# Altium footprint library PCB_IntegratedCircuit.PcbLib: 62 footprints (part 1 of 4)
Each footprint in its own frame and in the unit in brackets; x right, y up, seen from the top. Pads: shape width x height; smd on the part's side, far side on the other; paste and mask are expansions set on the pad; w line width, h text height; cw(c..) or ccw(c..) is an arc to the next point about the centre after c.
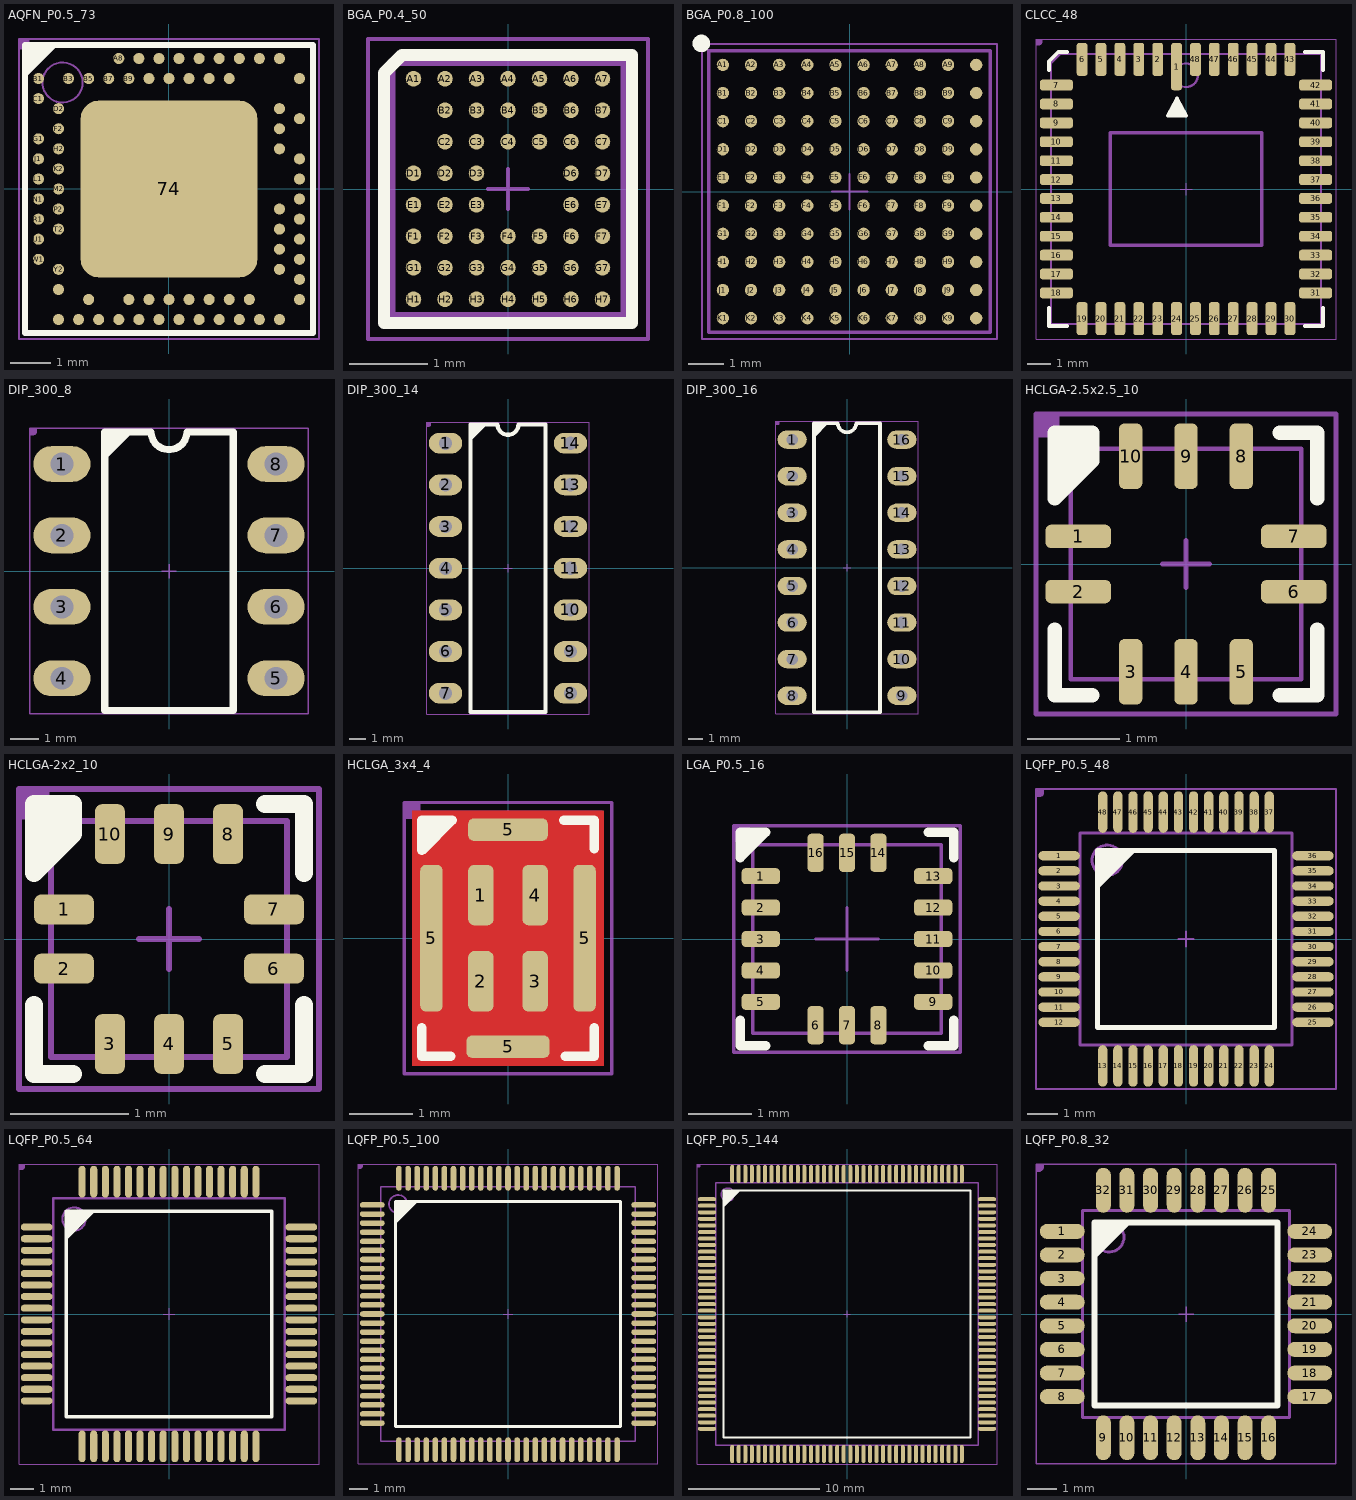
[diagram p0: the footprints below, top view; thin cyan lines are the x and y axes]

## AQFN_P0.5_73 [mm]
height 0.85
pads (74):
  rrect20% 4.4x4.4 smd mask+0.05: 74(0,0)
  round 0.275 smd paste+0.012 mask+0.05: A8(-1.25,3.25) A10(-0.75,3.25) A12(-0.25,3.25) A14(0.25,3.25) A16(0.75,3.25) A18(1.25,3.25) A20(1.75,3.25) A22(2.25,3.25) A23(2.75,3.25) AA24(3.25,-2.25) AB2(-2.75,-2.5) AC5(-2,-2.75) AC9(-1,-2.75) AC11(-0.5,-2.75) AC13(0,-2.75) AC15(0.5,-2.75) AC17(1,-2.75) AC19(1.5,-2.75) AC21(2,-2.75) AC24(3.25,-2.75) AD2(-2.75,-3.25) AD4(-2.25,-3.25) AD6(-1.75,-3.25) AD8(-1.25,-3.25) AD10(-0.75,-3.25) AD12(-0.25,-3.25) AD14(0.25,-3.25) AD16(0.75,-3.25) AD18(1.25,-3.25) AD20(1.75,-3.25) AD22(2.25,-3.25) AD23(2.75,-3.25) B1(-3.25,2.75) B3(-2.5,2.75) B5(-2,2.75) B7(-1.5,2.75) B9(-1,2.75) B11(-0.5,2.75) B13(0,2.75) B15(0.5,2.75) B17(1,2.75) B19(1.5,2.75) B24(3.25,2.75) C1(-3.25,2.25) D2(-2.75,2) D23(2.75,2) E24(3.25,1.75) F2(-2.75,1.5) F23(2.75,1.5) G1(-3.25,1.25) H2(-2.75,1) H23(2.75,1) J1(-3.25,0.75) J24(3.25,0.75) K2(-2.75,0.5) L1(-3.25,0.25) L24(3.25,0.25) M2(-2.75,0) N1(-3.25,-0.25) N24(3.25,-0.25) P2(-2.75,-0.5) P23(2.75,-0.5) R1(-3.25,-0.75) R24(3.25,-0.75) T2(-2.75,-1) T23(2.75,-1) U1(-3.25,-1.25) U24(3.25,-1.25) V23(2.75,-1.5) W1(-3.25,-1.75) W24(3.25,-1.75) Y2(-2.75,-2) Y23(2.75,-2)
Top Overlay:
  region: -2.769,3.581 -3.581,2.769 -3.581,3.581
  lines w0.152: -3.581,-3.581 -3.581,3.581 3.581,3.581 3.581,-3.581 -3.581,-3.581
Mechanical 13:
  circle w0.051: c-2.65,2.65 r0.5
  lines w0.051: -0.5,0 0.5,0 ; 0,-0.5 0,0.5 ; -3.531,-3.531 -3.531,3.531 3.531,3.531 3.531,-3.531 -3.531,-3.531
T-Component:
  region: -3.734,3.734 -3.48,3.734 -3.48,3.607 -3.48,3.582 -3.499,3.535 -3.535,3.499 -3.582,3.48 -3.607,3.48 -3.734,3.48
  lines w0.051: -3.734,-3.734 3.734,-3.734 3.734,3.734 -3.734,3.734 -3.734,-3.734
  text ".Designator" at -1.041,-0.635 h2.54
3D body "LGA88C25P25X25_700X700X85.step": height 0.85, standoff 0, extent -3.55,-3.55 3.55,3.55

## BGA_P0.4_50 [mm]
height 0.4
pads (50):
  round 0.198 smd: A1(-1.2,1.4) A2(-0.8,1.4) A3(-0.4,1.4) A4(0,1.4) A5(0.4,1.4) A6(0.8,1.4) A7(1.2,1.4) B2(-0.8,1) B3(-0.4,1) B4(0,1) B5(0.4,1) B6(0.8,1) B7(1.2,1) C2(-0.8,0.6) C3(-0.4,0.6) C4(0,0.6) C5(0.4,0.6) C6(0.8,0.6) C7(1.2,0.6) D1(-1.2,0.2) D2(-0.8,0.2) D3(-0.4,0.2) D6(0.8,0.2) D7(1.2,0.2) E1(-1.2,-0.2) E2(-0.8,-0.2) E3(-0.4,-0.2) E6(0.8,-0.2) E7(1.2,-0.2) F1(-1.2,-0.6) F2(-0.8,-0.6) F3(-0.4,-0.6) F4(0,-0.6) F5(0.4,-0.6) F6(0.8,-0.6) F7(1.2,-0.6) G1(-1.2,-1) G2(-0.8,-1) G3(-0.4,-1) G4(0,-1) G5(0.4,-1) G6(0.8,-1) G7(1.2,-1) H1(-1.2,-1.4) H2(-0.8,-1.4) H3(-0.4,-1.4) H4(0,-1.4) H5(0.4,-1.4) H6(0.8,-1.4) H7(1.2,-1.4)
Top Overlay:
  lines w0.152: -1.575,-1.702 -1.575,1.473 -1.346,1.702 1.575,1.702 1.575,-1.702 -1.575,-1.702
Mechanical 13:
  lines w0.051: -0.254,0 0.254,0 ; 0,-0.254 0,0.254
  lines w0.1: -1.48,-1.615 -1.48,1.615 1.48,1.615 1.48,-1.615 -1.48,-1.615
T-Component:
  lines w0.051: -1.778,-1.905 -1.778,1.905 1.778,1.905 1.778,-1.905 -1.778,-1.905
3D body "BGA56C40P7X8_296X323X40.step": height 0.4, standoff 0, extent -1.48,-1.615 1.48,1.615

## BGA_P0.8_100 [mm]
height 1.1
pads (100):
  round 0.35 smd: A1(-3.6,3.6) A2(-2.8,3.6) A3(-2,3.6) A4(-1.2,3.6) A5(-0.4,3.6) A6(0.4,3.6) A7(1.2,3.6) A8(2,3.6) A9(2.8,3.6) A10(3.6,3.6) B1(-3.6,2.8) B2(-2.8,2.8) B3(-2,2.8) B4(-1.2,2.8) B5(-0.4,2.8) B6(0.4,2.8) B7(1.2,2.8) B8(2,2.8) B9(2.8,2.8) B10(3.6,2.8) C1(-3.6,2) C2(-2.8,2) C3(-2,2) C4(-1.2,2) C5(-0.4,2) C6(0.4,2) C7(1.2,2) C8(2,2) C9(2.8,2) C10(3.6,2) D1(-3.6,1.2) D2(-2.8,1.2) D3(-2,1.2) D4(-1.2,1.2) D5(-0.4,1.2) D6(0.4,1.2) D7(1.2,1.2) D8(2,1.2) D9(2.8,1.2) D10(3.6,1.2) E1(-3.6,0.4) E2(-2.8,0.4) E3(-2,0.4) E4(-1.2,0.4) E5(-0.4,0.4) E6(0.4,0.4) E7(1.2,0.4) E8(2,0.4) E9(2.8,0.4) E10(3.6,0.4) F1(-3.6,-0.4) F2(-2.8,-0.4) F3(-2,-0.4) F4(-1.2,-0.4) F5(-0.4,-0.4) F6(0.4,-0.4) F7(1.2,-0.4) F8(2,-0.4) F9(2.8,-0.4) F10(3.6,-0.4) G1(-3.6,-1.2) G2(-2.8,-1.2) G3(-2,-1.2) G4(-1.2,-1.2) G5(-0.4,-1.2) G6(0.4,-1.2) G7(1.2,-1.2) G8(2,-1.2) G9(2.8,-1.2) G10(3.6,-1.2) H1(-3.6,-2) H2(-2.8,-2) H3(-2,-2) H4(-1.2,-2) H5(-0.4,-2) H6(0.4,-2) H7(1.2,-2) H8(2,-2) H9(2.8,-2) H10(3.6,-2) J1(-3.6,-2.8) J2(-2.8,-2.8) J3(-2,-2.8) J4(-1.2,-2.8) J5(-0.4,-2.8) J6(0.4,-2.8) J7(1.2,-2.8) J8(2,-2.8) J9(2.8,-2.8) J10(3.6,-2.8) K1(-3.6,-3.6) K2(-2.8,-3.6) K3(-2,-3.6) K4(-1.2,-3.6) K5(-0.4,-3.6) K6(0.4,-3.6) K7(1.2,-3.6) K8(2,-3.6) K9(2.8,-3.6) K10(3.6,-3.6)
Top Overlay:
  circle w0.25: c-4.21,4.21 r0.125
Mechanical 13:
  lines w0.1: -4,-4 -4,4 4,4 4,-4 -4,-4
T-Component:
  lines w0.051: -0.508,0 0.508,0 ; 0,-0.508 0,0.508 ; -4.191,-4.191 -4.191,4.191 4.191,4.191 4.191,-4.191 -4.191,-4.191
3D body "BGA100C80P10X10_800X800X110.step": height 1.1, standoff 0, extent -4,-4 4,4

## CLCC_48 [mil]
height 90.55
pads (48):
  rrect50% 18x79 smd: 1(-15.75,204)
  rrect50% 18x55 smd: 2(-47.24,216) 3(-78.74,216) 4(-110.24,216) 5(-141.73,216) 6(-173.23,216) 19(-173.23,-216) 20(-141.73,-216) 21(-110.24,-216) 22(-78.74,-216) 23(-47.24,-216) 24(-15.75,-216) 25(15.75,-216) 26(47.24,-216) 27(78.74,-216) 28(110.24,-216) 29(141.73,-216) 30(173.23,-216) 43(173.23,216) 44(141.73,216) 45(110.24,216) 46(78.74,216) 47(47.24,216) 48(15.75,216)
  rrect50% 55x18 smd: 7(-216,173.23) 8(-216,141.73) 9(-216,110.24) 10(-216,78.74) 11(-216,47.24) 12(-216,15.75) 13(-216,-15.75) 14(-216,-47.24) 15(-216,-78.74) 16(-216,-110.24) 17(-216,-141.73) 18(-216,-173.23) 31(216,-173.23) 32(216,-141.73) 33(216,-110.24) 34(216,-78.74) 35(216,-47.24) 36(216,-15.75) 37(216,15.75) 38(216,47.24) 39(216,78.74) 40(216,110.24) 41(216,141.73) 42(216,173.23)
Top Overlay:
  region: -15,151 -30.26,122 0.26,122
  lines w6: -228.35,-197.83 -228.35,-228.35 -197.83,-228.35 ; -228.35,197.83 -228.35,213.09 -213.09,228.35 -197.83,228.35 ; 197.83,-228.35 228.35,-228.35 228.35,-197.83 ; 197.83,228.35 228.35,228.35 228.35,197.83 ; -30.26,122 0.26,122 -15,151 -30.26,122
Mechanical 13:
  circle w3.94: c0,189.57 r19.68
  lines w2: -10,0 10,0 ; 0,-10 0,10
  lines w3.94: -225,-225 -225,209.74 -209.74,225 225,225 225,-225 -225,-225
  lines w6: -126,-94 -126,94 126,94 126,-94 -126,-94
T-Component:
  region: -250,250 -240,250 -240,245 -240,244.01 -240.76,242.17 -242.17,240.76 -244.01,240 -245,240 -250,240
  lines w2: -250,-250 250,-250 250,250 -250,250 -250,-250
  text ".Designator" at -41,-25 h100
3D body "User Library-CLCC48.STEP": height 79.69, standoff 0, extent -250,-250 250,250

## DIP_300_8 [mil]
pads (8):
  oval 80x50 hole 32: 1(-150,150) 2(-150,50) 3(-150,-50) 4(-150,-150) 5(150,-150) 6(150,-50) 7(150,50) 8(150,150)
Top Overlay:
  region: -90,194.69 -50.63,194.69 -90,155.31
  lines w10: -90,-195 -90,195 -25,195 ccw(c0,195) 25,195 90,195 90,-195 -90,-195
Mechanical 13:
  lines w2: -10,0 10,0 ; 0,-10 0,10
T-Component:
  region: -195,200 -185,200 -185,195 -185,194.01 -185.76,192.17 -187.17,190.76 -189.01,190 -190,190 -195,190
  lines w2: -195,-200 -195,200 195,200 195,-200 -195,-200
  text ".Designator" at -41,-25 h100
3D body "User Library-DIP8test.STEP": height 179.92, standoff -150, extent -153.94,-195.07 153.94,195.08

## DIP_300_14 [mil]
pads (14):
  oval 80x50 hole 32: 1(-150,300) 2(-150,200) 3(-150,100) 4(-150,0) 5(-150,-100) 6(-150,-200) 7(-150,-300) 8(150,-300) 9(150,-200) 10(150,-100) 11(150,0) 12(150,100) 13(150,200) 14(150,300)
Top Overlay:
  region: -90,344.69 -50.63,344.69 -90,305.31
  lines w10: -90,-345 -90,345 -25,345 ccw(c0,345) 25,345 90,345 90,-345 -90,-345
Mechanical 13:
  lines w2: -10,0 10,0 ; 0,-10 0,10
T-Component:
  region: -195,350 -185,350 -185,345 -185,344.01 -185.76,342.17 -187.17,340.76 -189.01,340 -190,340 -195,340
  lines w2: -195,-350 -195,350 195,350 195,-350 -195,-350
  text ".Designator" at -41,-25 h100
3D body "SW3dPS-DIP14-300.STEP": height 200, standoff -98.03, extent -154.92,-383.86 154.93,383.86

## DIP_300_16 [mil]
pads (16):
  oval 80x50 hole 32: 1(-150,350) 2(-150,250) 3(-150,150) 4(-150,50) 5(-150,-50) 6(-150,-150) 7(-150,-250) 8(-150,-350) 9(150,-350) 10(150,-250) 11(150,-150) 12(150,-50) 13(150,50) 14(150,150) 15(150,250) 16(150,350)
Top Overlay:
  region: -90,394.69 -50.63,394.69 -90,355.31
  lines w10: -90,-395 -90,395 -25,395 ccw(c0,395) 25,395 90,395 90,-395 -90,-395
Mechanical 13:
  lines w2: -10,0 10,0 ; 0,-10 0,10
T-Component:
  region: -195,400 -185,400 -185,395 -185,394.01 -185.76,392.17 -187.17,390.76 -189.01,390 -190,390 -195,390
  lines w2: -195,-400 195,-400 195,400 -195,400 -195,-400
  text ".Designator" at -41,-25 h100
3D body "User Library-DIP16-22mm.STEP": height 202.76, standoff -98.03, extent -155,-433.07 154.84,433.07

## HCLGA-2.5x2.5_10 [mil]
height 31.5
pads (10):
  rrect50% 28x10 smd: 1(-46,11.81) 2(-46,-11.81) 6(46,-11.81) 7(46,11.81)
  rrect50% 10x28 smd: 3(-23.62,-46) 4(0,-46) 5(23.62,-46) 8(23.62,46) 9(0,46) 10(-23.62,46)
Top Overlay:
  region: -40,44 -40,56 -56,56 -56,28
  lines w6: -56,-28 -56,-56 -40,-56 ; 40,-56 56,-56 56,-28 ; 40,56 56,56 56,28 ; -56,28 -56,56 -40,56 -40,44 -56,28
Top Solder:
  region: -32,-11.81 -32,11.81 -60,11.81 -60,-11.81
  region: 60,-11.81 60,11.81 32,11.81 32,-11.81
  region: 23.62,-32 -23.62,-32 -23.62,-60 23.62,-60
  rectangle: -23.62,32 23.62,60
Mechanical 13:
  lines w2: -10,0 10,0 ; 0,-10 0,10 ; -49.21,-49.21 49.22,-49.21 49.22,49.22 -49.21,49.22 -49.21,-49.21
T-Component:
  region: -64,64 -54,64 -54,59 -54,58.01 -54.76,56.17 -56.17,54.76 -58.01,54 -59,54 -64,54
  lines w2: -64,-64 64,-64 64,64 -64,64 -64,-64
  text ".Designator" at -41,-25 h100
3D body "PQFN60P250X250X80-10N.step": height 31.5, standoff -0.04, extent -49.21,-49.21 49.22,49.22

## HCLGA-2x2_10 [mil]
height 31.5
pads (10):
  rrect50% 20x10 smd: 1(-35,9.84) 2(-35,-9.84) 6(35,-9.84) 7(35,9.84)
  rrect50% 10x20 smd: 3(-19.68,-35) 4(0,-35) 5(19.68,-35) 8(19.68,35) 9(0,35) 10(-19.68,35)
Top Overlay:
  region: -32,45 -45,45 -45,22 -32,35
  lines w6: -45,-22 -45,-45 -32,-45 ; 32,-45 45,-45 45,-22 ; 32,45 45,45 45,22 ; -45,22 -32,35 -32,45 -45,45 -45,22
Top Solder:
  rectangle: -19.68,-45 19.68,-25
  region: 19.68,45 -19.68,45 -19.68,25 19.68,25
  region: 45,-9.84 45,9.84 25,9.84 25,-9.84
  region: -25,-9.84 -25,9.84 -45,9.84 -45,-9.84
Mechanical 13:
  lines w2: -10,0 10,0 ; 0,-10 0,10 ; -39.37,-39.37 39.37,-39.37 39.37,39.37 -39.37,39.37 -39.37,-39.37
T-Component:
  region: -50,50 -40,50 -40,45 -40,44.01 -40.76,42.17 -42.17,40.76 -44.01,40 -45,40 -50,40
  lines w2: -50,-50 50,-50 50,50 -50,50 -50,-50
  text ".Designator" at -41,-25 h100
3D body "PQFN50P200X200X80-10N.step": height 31.5, standoff -0.04, extent -39.37,-39.37 39.37,39.37

## HCLGA_3x4_4 [mil]
pads (8):
  rrect50% 16x38 smd: 1(-17,27) 2(-17,-27) 3(17,-27) 4(17,27)
  rrect50% 14x92 smd: 5(-48,0) 5(48,0)
  rrect50% 52x14 smd: 5(0,-68)
  rrect50% 50x14 smd: 5(0,68)
Top Layer:
  pour cut-out: -60,80 60,80 60,-80 -60,-80
Top Overlay:
  region: -54,74 -35,74 -54,55
  lines w6: -54,-56 -54,-74 -36,-74 ; 35,74 54,74 54,56 ; 36,-74 54,-74 54,-56 ; -54,55 -35,74 -54,74 -54,55
Mechanical 13:
  lines w2: -10,0 10,0 ; 0,-10 0,10 ; -59,-79 -59,79 59,79 59,-79 -59,-79
T-Component:
  region: -65,85 -55,85 -55,80 -55,79.01 -55.76,77.17 -57.17,75.76 -59.01,75 -60,75 -65,75
  lines w2: -65,-85 65,-85 65,85 -65,85 -65,-85
  text ".Designator" at -41,-25 h100
3D body "User Library-DFN12(3x4).STEP": height 29.92, standoff 0, extent -59.08,-78.74 59.1,78.74

## LGA_P0.5_16 [mil]
height 29.53
pads (16):
  rrect50% 24x10 smd: 1(-54,39.37) 2(-54,19.68) 3(-54,0) 4(-54,-19.68) 5(-54,-39.37) 9(54,-39.37) 10(54,-19.68) 11(54,0) 12(54,19.68) 13(54,39.37)
  rrect50% 10x24 smd: 6(-19.68,-54) 7(0,-54) 8(19.68,-54) 14(19.68,54) 15(0,54) 16(-19.68,54)
Top Overlay:
  region: -67,67 -51,67 -67,51
  lines w6: -67,-51 -67,-67 -51,-67 ; 51,-67 67,-67 67,-51 ; 51,67 67,67 67,51 ; -67,51 -67,67 -51,67 -67,51
Top Solder:
  region: 20,-41 -20,-41 -20,-67 20,-67
  region: -41,-40 -41,40 -67,40 -67,-40
  region: 41,40 41,-40 67,-40 67,40
  rectangle: -20,41 20,67
Mechanical 13:
  lines w2: -19.68,0 19.68,0 ; 0,-19.68 0,19.68 ; -59.06,-59.06 59.06,-59.06 59.06,59.06 -59.06,59.06 -59.06,-59.06
T-Component:
  region: -71,71 -61,71 -61,66 -61,65.01 -61.76,63.17 -63.17,61.76 -65.01,61 -66,61 -71,61
  lines w2: -71,-71 71,-71 71,71 -71,71 -71,-71
  text ".Designator" at -41,-25 h100
3D body "PQFN50P300X300X75-16L.step": height 29.53, standoff 0, extent -59.06,-59.06 59.06,59.06

## LQFP_P0.5_48 [mil]
height 62.99
pads (48):
  oval 54x12 smd: 1(-165,108.27) 2(-165,88.58) 3(-165,68.9) 4(-165,49.21) 5(-165,29.53) 6(-165,9.84) 7(-165,-9.84) 8(-165,-29.53) 9(-165,-49.21) 10(-165,-68.9) 11(-165,-88.58) 12(-165,-108.27) 25(165,-108.27) 26(165,-88.58) 27(165,-68.9) 28(165,-49.21) 29(165,-29.53) 30(165,-9.84) 31(165,9.84) 32(165,29.53) 33(165,49.21) 34(165,68.9) 35(165,88.58) 36(165,108.27)
  oval 12x54 smd: 13(-108.27,-165) 14(-88.58,-165) 15(-68.9,-165) 16(-49.21,-165) 17(-29.53,-165) 18(-9.84,-165) 19(9.84,-165) 20(29.53,-165) 21(49.21,-165) 22(68.9,-165) 23(88.58,-165) 24(108.27,-165) 37(108.27,165) 38(88.58,165) 39(68.9,165) 40(49.21,165) 41(29.53,165) 42(9.84,165) 43(-9.84,165) 44(-29.53,165) 45(-49.21,165) 46(-68.9,165) 47(-88.58,165) 48(-108.27,165)
Top Overlay:
  region: -115,115 -65,115 -115,65
  lines w6: -115,-115 115,-115 115,115 -115,115 -115,-115
Mechanical 13:
  circle w3.94: c-102.36,102.36 r19.68
  lines w2: -10,0 10,0 ; 0,-10 0,10
  lines w3.94: -137.8,-137.8 137.8,-137.8 137.8,137.8 -137.8,137.8 -137.8,-137.8
T-Component:
  region: -195,195 -185,195 -185,190 -185,189.01 -185.76,187.17 -187.17,185.76 -189.01,185 -190,185 -195,185
  lines w2: -195,-195 -195,195 195,195 195,-195 -195,-195
  text ".Designator" at -41,-25 h100
3D body "SW3dPS-Quad50M48.STEP": height 61.42, standoff 0, extent -177.16,-177.66 177.17,176.67

## LQFP_P0.5_64 [mil]
height 47.24
pads (64):
  oval 54x12 smd: 1(-225,147.64) 2(-225,127.95) 3(-225,108.27) 4(-225,88.58) 5(-225,68.9) 6(-225,49.21) 7(-225,29.53) 8(-225,9.84) 9(-225,-9.84) 10(-225,-29.53) 11(-225,-49.21) 12(-225,-68.9) 13(-225,-88.58) 14(-225,-108.27) 15(-225,-127.95) 16(-225,-147.64) 33(225,-147.64) 34(225,-127.95) 35(225,-108.27) 36(225,-88.58) 37(225,-68.9) 38(225,-49.21) 39(225,-29.53) 40(225,-9.84) 41(225,9.84) 42(225,29.53) 43(225,49.21) 44(225,68.9) 45(225,88.58) 46(225,108.27) 47(225,127.95) 48(225,147.64)
  oval 12x54 smd: 17(-147.64,-225) 18(-127.95,-225) 19(-108.27,-225) 20(-88.58,-225) 21(-68.9,-225) 22(-49.21,-225) 23(-29.53,-225) 24(-9.84,-225) 25(9.84,-225) 26(29.53,-225) 27(49.21,-225) 28(68.9,-225) 29(88.58,-225) 30(108.27,-225) 31(127.95,-225) 32(147.64,-225) 49(147.64,225) 50(127.95,225) 51(108.27,225) 52(88.58,225) 53(68.9,225) 54(49.21,225) 55(29.53,225) 56(9.84,225) 57(-9.84,225) 58(-29.53,225) 59(-49.21,225) 60(-68.9,225) 61(-88.58,225) 62(-108.27,225) 63(-127.95,225) 64(-147.64,225)
Top Overlay:
  region: -175,175 -125,175 -175,125
  lines w6: -175,-175 175,-175 175,175 -175,175 -175,-175
Mechanical 13:
  circle w3.94: c-161.42,161.42 r19.68
  lines w2: -10,0 10,0 ; 0,-10 0,10
  lines w3.94: -196.85,-196.85 -196.85,196.85 196.85,196.85 196.85,-196.85 -196.85,-196.85
T-Component:
  region: -255,255 -245,255 -245,250 -245,249.01 -245.76,247.17 -247.17,245.76 -249.01,245 -250,245 -255,245
  lines w2: -255,-255 -255,255 255,255 255,-255 -255,-255
  text ".Designator" at -41,-25 h100
3D body "User Library-lqpf64.STEP": height 59.06, standoff 0.79, extent -236.21,-236.22 236.23,236.22

## LQFP_P0.5_100 [mil]
height 62.99
pads (100):
  oval 54x12 smd: 1(-294,236.22) 2(-294,216.54) 3(-294,196.85) 4(-294,177.17) 5(-294,157.48) 6(-294,137.8) 7(-294,118.11) 8(-294,98.43) 9(-294,78.74) 10(-294,59.06) 11(-294,39.37) 12(-294,19.68) 13(-294,0) 14(-294,-19.69) 15(-294,-39.37) 16(-294,-59.06) 17(-294,-78.74) 18(-294,-98.43) 19(-294,-118.11) 20(-294,-137.8) 21(-294,-157.48) 22(-294,-177.17) 23(-294,-196.85) 24(-294,-216.54) 25(-294,-236.22) 51(294,-236.22) 52(294,-216.54) 53(294,-196.85) 54(294,-177.17) 55(294,-157.48) 56(294,-137.8) 57(294,-118.11) 58(294,-98.43) 59(294,-78.74) 60(294,-59.06) 61(294,-39.37) 62(294,-19.69) 63(294,0) 64(294,19.68) 65(294,39.37) 66(294,59.06) 67(294,78.74) 68(294,98.43) 69(294,118.11) 70(294,137.8) 71(294,157.48) 72(294,177.17) 73(294,196.85) 74(294,216.54) 75(294,236.22)
  oval 12x54 smd: 26(-236.22,-294) 27(-216.54,-294) 28(-196.85,-294) 29(-177.17,-294) 30(-157.48,-294) 31(-137.8,-294) 32(-118.11,-294) 33(-98.43,-294) 34(-78.74,-294) 35(-59.06,-294) 36(-39.37,-294) 37(-19.68,-294) 38(0,-294) 39(19.69,-294) 40(39.37,-294) 41(59.06,-294) 42(78.74,-294) 43(98.43,-294) 44(118.11,-294) 45(137.8,-294) 46(157.48,-294) 47(177.17,-294) 48(196.85,-294) 49(216.54,-294) 50(236.22,-294) 76(236.22,294) 77(216.54,294) 78(196.85,294) 79(177.17,294) 80(157.48,294) 81(137.8,294) 82(118.11,294) 83(98.43,294) 84(78.74,294) 85(59.06,294) 86(39.37,294) 87(19.69,294) 88(0,294) 89(-19.68,294) 90(-39.37,294) 91(-59.06,294) 92(-78.74,294) 93(-98.43,294) 94(-118.11,294) 95(-137.8,294) 96(-157.48,294) 97(-177.17,294) 98(-196.85,294) 99(-216.54,294) 100(-236.22,294)
Top Overlay:
  region: -244,244 -194,244 -244,194
  lines w6: -244,-244 -244,244 244,244 244,-244 -244,-244
Mechanical 13:
  circle w3.94: c-238.19,238.19 r19.68
  lines w2: -10,0 10,0 ; 0,-10 0,10
  lines w3.94: -275.59,-275.59 275.59,-275.59 275.59,275.59 -275.59,275.59 -275.59,-275.59
T-Component:
  region: -325,325 -315,325 -315,320 -315,319.01 -315.76,317.17 -317.17,315.76 -319.01,315 -320,315 -325,315
  lines w2: -325,-325 -325,325 325,325 325,-325 -325,-325
  text ".Designator" at -41,-25 h100
3D body "User Library-LQFP100-0_5.STEP": height 61.5, standoff -0.39, extent -310.47,-310.47 310.49,310.48

## LQFP_P0.5_144 [mil]
height 62.99
pads (144):
  oval 54x12 smd: 1(-420,344.49) 2(-420,324.8) 3(-420,305.12) 4(-420,285.43) 5(-420,265.75) 6(-420,246.06) 7(-420,226.38) 8(-420,206.69) 9(-420,187.01) 10(-420,167.32) 11(-420,147.64) 12(-420,127.95) 13(-420,108.27) 14(-420,88.58) 15(-420,68.9) 16(-420,49.21) 17(-420,29.53) 18(-420,9.84) 19(-420,-9.84) 20(-420,-29.53) 21(-420,-49.21) 22(-420,-68.9) 23(-420,-88.58) 24(-420,-108.27) 25(-420,-127.95) 26(-420,-147.64) 27(-420,-167.32) 28(-420,-187.01) 29(-420,-206.69) 30(-420,-226.38) 31(-420,-246.06) 32(-420,-265.75) 33(-420,-285.43) 34(-420,-305.12) 35(-420,-324.8) 36(-420,-344.49) 73(420,-344.49) 74(420,-324.8) 75(420,-305.12) 76(420,-285.43) 77(420,-265.75) 78(420,-246.06) 79(420,-226.38) 80(420,-206.69) 81(420,-187.01) 82(420,-167.32) 83(420,-147.64) 84(420,-127.95) 85(420,-108.27) 86(420,-88.58) 87(420,-68.9) 88(420,-49.21) 89(420,-29.53) 90(420,-9.84) 91(420,9.84) 92(420,29.53) 93(420,49.21) 94(420,68.9) 95(420,88.58) 96(420,108.27) 97(420,127.95) 98(420,147.64) 99(420,167.32) 100(420,187.01) 101(420,206.69) 102(420,226.38) 103(420,246.06) 104(420,265.75) 105(420,285.43) 106(420,305.12) 107(420,324.8) 108(420,344.49)
  oval 12x54 smd: 37(-344.49,-420) 38(-324.8,-420) 39(-305.12,-420) 40(-285.43,-420) 41(-265.75,-420) 42(-246.06,-420) 43(-226.38,-420) 44(-206.69,-420) 45(-187.01,-420) 46(-167.32,-420) 47(-147.64,-420) 48(-127.95,-420) 49(-108.27,-420) 50(-88.58,-420) 51(-68.9,-420) 52(-49.21,-420) 53(-29.53,-420) 54(-9.84,-420) 55(9.84,-420) 56(29.53,-420) 57(49.21,-420) 58(68.9,-420) 59(88.58,-420) 60(108.27,-420) 61(127.95,-420) 62(147.64,-420) 63(167.32,-420) 64(187.01,-420) 65(206.69,-420) 66(226.38,-420) 67(246.06,-420) 68(265.75,-420) 69(285.43,-420) 70(305.12,-420) 71(324.8,-420) 72(344.49,-420) 109(344.49,420) 110(324.8,420) 111(305.12,420) 112(285.43,420) 113(265.75,420) 114(246.06,420) 115(226.38,420) 116(206.69,420) 117(187.01,420) 118(167.32,420) 119(147.64,420) 120(127.95,420) 121(108.27,420) 122(88.58,420) 123(68.9,420) 124(49.21,420) 125(29.53,420) 126(9.84,420) 127(-9.84,420) 128(-29.53,420) 129(-49.21,420) 130(-68.9,420) 131(-88.58,420) 132(-108.27,420) 133(-127.95,420) 134(-147.64,420) 135(-167.32,420) 136(-187.01,420) 137(-206.69,420) 138(-226.38,420) 139(-246.06,420) 140(-265.75,420) 141(-285.43,420) 142(-305.12,420) 143(-324.8,420) 144(-344.49,420)
Top Overlay:
  region: -370,370 -320,370 -370,320
  lines w6: -370,-370 -370,370 370,370 370,-370 -370,-370
Mechanical 13:
  circle w4: c-358.27,358.27 r19.68
  lines w2: -10,0 10,0 ; 0,-10 0,10
  lines w4: -393.7,-393.7 -393.7,393.7 393.7,393.7 393.7,-393.7 -393.7,-393.7
T-Component:
  region: -450,450 -440,450 -440,445 -440,444.01 -440.76,442.17 -442.17,440.76 -444.01,440 -445,440 -450,440
  lines w2: -450,-450 450,-450 450,450 -450,450 -450,-450
  text ".Designator" at -41,-25 h100
3D body "User Library-LQFP144.STEP": height 62.99, standoff 0, extent -433.07,-433.07 433.08,433.08

## LQFP_P0.8_32 [mil]
height 47.24
pads (32):
  oval 60x20 smd: 1(-165,110.24) 2(-165,78.74) 3(-165,47.24) 4(-165,15.75) 5(-165,-15.75) 6(-165,-47.24) 7(-165,-78.74) 8(-165,-110.24) 17(165,-110.24) 18(165,-78.74) 19(165,-47.24) 20(165,-15.75) 21(165,15.75) 22(165,47.24) 23(165,78.74) 24(165,110.24)
  oval 20x60 smd: 9(-110.24,-165) 10(-78.74,-165) 11(-47.24,-165) 12(-15.75,-165) 13(15.75,-165) 14(47.24,-165) 15(78.74,-165) 16(110.24,-165) 25(110.24,165) 26(78.74,165) 27(47.24,165) 28(15.75,165) 29(-15.75,165) 30(-47.24,165) 31(-78.74,165) 32(-110.24,165)
Top Overlay:
  region: -122.05,122.05 -72.05,122.05 -122.05,72.05
  lines w7.87: -122.05,-122.05 122.05,-122.05 122.05,122.05 -122.05,122.05 -122.05,-122.05
Mechanical 13:
  circle w3.94: c-102.36,102.36 r19.68
  lines w2: -10,0 10,0 ; 0,-10 0,10
  lines w3.94: -137.8,-137.8 137.8,-137.8 137.8,137.8 -137.8,137.8 -137.8,-137.8
T-Component:
  region: -200,200 -190,200 -190,195 -190,194.01 -190.76,192.17 -192.17,190.76 -194.01,190 -195,190 -200,190
  lines w2: -200,-200 -200,200 200,200 200,-200 -200,-200
  text ".Designator" at -41,-25 h100
3D body "User Library-LQFP32-0_8.STEP": height 63.46, standoff -2.02, extent -177.92,-177.92 177.93,177.93